# EAGLE library part H9HP52ACPMADAR-KMM (library H9HP52ACPMADAR)
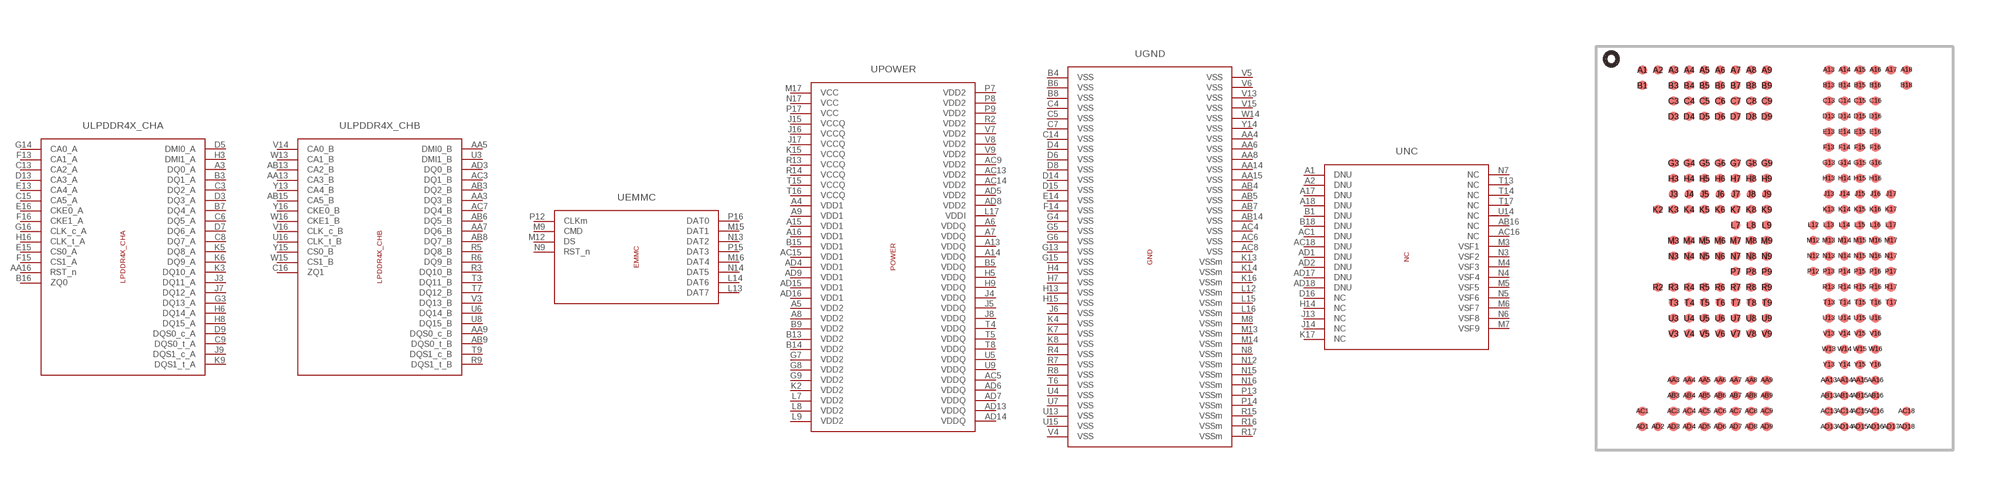
[diagram p0: symbol with the pads of FBGA254_11.5X13.0_P0.50; footprint FBGA254_11.5X13.0_P0.50]

Designator prefix U; gates LPDDR4X_CHA=LPDDR4X_CHA LPDDR4X_CHB=LPDDR4X_CHB EMMC=EMMC POWER=POWER GND=GND NC=NC

## H9HP52ACPMADAR-KMM  [FBGA254_11.5X13.0_P0.50]
A1  NC:DNU  nc
A2  NC:DNU  nc
A3  LPDDR4X_CHA:DQ0_A
A4  POWER:VDD1  pwr
A5  POWER:VDD2  pwr
A6  POWER:VDDQ  pwr
A7  POWER:VDDQ  pwr
A8  POWER:VDD2  pwr
A9  POWER:VDD1  pwr
A13  POWER:VDDQ  pwr
A14  POWER:VDDQ  pwr
A15  POWER:VDD1  pwr
A16  POWER:VDD1  pwr
A17  NC:DNU  nc
A18  NC:DNU  nc
AA3  LPDDR4X_CHB:DQ3_B
AA4  GND:VSS  pas
AA5  LPDDR4X_CHB:DMI0_B
AA6  GND:VSS  pas
AA7  LPDDR4X_CHB:DQ6_B
AA8  GND:VSS  pas
AA9  LPDDR4X_CHB:DQS0_c_B
AA13  LPDDR4X_CHB:CA3_B  in
AA14  GND:VSS  pas
AA15  GND:VSS  pas
AA16  LPDDR4X_CHA:RST_n  in
AB3  LPDDR4X_CHB:DQ2_B
AB4  GND:VSS  pas
AB5  GND:VSS  pas
AB6  LPDDR4X_CHB:DQ5_B
AB7  GND:VSS  pas
AB8  LPDDR4X_CHB:DQ7_B
AB9  LPDDR4X_CHB:DQS0_t_B
AB13  LPDDR4X_CHB:CA2_B  in
AB14  GND:VSS  pas
AB15  LPDDR4X_CHB:CA5_B  in
AB16  NC:NC  nc
AC1  NC:DNU  nc
AC3  LPDDR4X_CHB:DQ1_B
AC4  GND:VSS  pas
AC5  POWER:VDDQ  pwr
AC6  GND:VSS  pas
AC7  LPDDR4X_CHB:DQ4_B
AC8  GND:VSS  pas
AC9  POWER:VDD2  pwr
AC13  POWER:VDD2  pwr
AC14  POWER:VDD2  pwr
AC15  POWER:VDD1  pwr
AC16  NC:NC  nc
AC18  NC:DNU  nc
AD1  NC:DNU  nc
AD2  NC:DNU  nc
AD3  LPDDR4X_CHB:DQ0_B
AD4  POWER:VDD1  pwr
AD5  POWER:VDD2  pwr
AD6  POWER:VDDQ  pwr
AD7  POWER:VDDQ  pwr
AD8  POWER:VDD2  pwr
AD9  POWER:VDD1  pwr
AD13  POWER:VDDQ  pwr
AD14  POWER:VDDQ  pwr
AD15  POWER:VDD1  pwr
AD16  POWER:VDD1  pwr
AD17  NC:DNU  nc
AD18  NC:DNU  nc
B1  NC:DNU  nc
B3  LPDDR4X_CHA:DQ1_A
B4  GND:VSS  pas
B5  POWER:VDDQ  pwr
B6  GND:VSS  pas
B7  LPDDR4X_CHA:DQ4_A
B8  GND:VSS  pas
B9  POWER:VDD2  pwr
B13  POWER:VDD2  pwr
B14  POWER:VDD2  pwr
B15  POWER:VDD1  pwr
B16  LPDDR4X_CHA:ZQ0  pas
B18  NC:DNU  nc
C3  LPDDR4X_CHA:DQ2_A
C4  GND:VSS  pas
C5  GND:VSS  pas
C6  LPDDR4X_CHA:DQ5_A
C7  GND:VSS  pas
C8  LPDDR4X_CHA:DQ7_A
C9  LPDDR4X_CHA:DQS0_t_A
C13  LPDDR4X_CHA:CA2_A  in
C14  GND:VSS  pas
C15  LPDDR4X_CHA:CA5_A  in
C16  LPDDR4X_CHB:ZQ1  pas
D3  LPDDR4X_CHA:DQ3_A
D4  GND:VSS  pas
D5  LPDDR4X_CHA:DMI0_A
D6  GND:VSS  pas
D7  LPDDR4X_CHA:DQ6_A
D8  GND:VSS  pas
D9  LPDDR4X_CHA:DQS0_c_A
D13  LPDDR4X_CHA:CA3_A  in
D14  GND:VSS  pas
D15  GND:VSS  pas
D16  NC:NC  nc
E13  LPDDR4X_CHA:CA4_A  in
E14  GND:VSS  pas
E15  LPDDR4X_CHA:CS0_A  in
E16  LPDDR4X_CHA:CKE0_A  in
F13  LPDDR4X_CHA:CA1_A  in
F14  GND:VSS  pas
F15  LPDDR4X_CHA:CS1_A  in
F16  LPDDR4X_CHA:CKE1_A  in
G3  LPDDR4X_CHA:DQ13_A
G4  GND:VSS  pas
G5  GND:VSS  pas
G6  GND:VSS  pas
G7  POWER:VDD2  pwr
G8  POWER:VDD2  pwr
G9  POWER:VDD2  pwr
G13  GND:VSS  pas
G14  LPDDR4X_CHA:CA0_A  in
G15  GND:VSS  pas
G16  LPDDR4X_CHA:CLK_c_A  in
H3  LPDDR4X_CHA:DMI1_A
H4  GND:VSS  pas
H5  POWER:VDDQ  pwr
H6  LPDDR4X_CHA:DQ14_A
H7  GND:VSS  pas
H8  LPDDR4X_CHA:DQ15_A
H9  POWER:VDDQ  pwr
H13  GND:VSS  pas
H14  NC:NC  nc
H15  GND:VSS  pas
H16  LPDDR4X_CHA:CLK_t_A  in
J3  LPDDR4X_CHA:DQ11_A
J4  POWER:VDDQ  pwr
J5  POWER:VDDQ  pwr
J6  GND:VSS  pas
J7  LPDDR4X_CHA:DQ12_A
J8  POWER:VDDQ  pwr
J9  LPDDR4X_CHA:DQS1_c_A
J13  NC:NC  nc
J14  NC:NC  nc
J15  POWER:VCCQ  pwr
J16  POWER:VCCQ  pwr
J17  POWER:VCCQ  pwr
K2  POWER:VDD2  pwr
K3  LPDDR4X_CHA:DQ10_A
K4  GND:VSS  pas
K5  LPDDR4X_CHA:DQ8_A
K6  LPDDR4X_CHA:DQ9_A
K7  GND:VSS  pas
K8  GND:VSS  pas
K9  LPDDR4X_CHA:DQS1_t_A
K13  GND:VSSm  pas
K14  GND:VSSm  pas
K15  POWER:VCCQ  pwr
K16  GND:VSSm  pas
K17  NC:NC  nc
L7  POWER:VDD2  pwr
L8  POWER:VDD2  pwr
L9  POWER:VDD2  pwr
L12  GND:VSSm  pas
L13  EMMC:DAT7
L14  EMMC:DAT6
L15  GND:VSSm  pas
L16  GND:VSSm  pas
L17  POWER:VDDI  pas
M3  NC:VSF1  nc
M4  NC:VSF3  nc
M5  NC:VSF5  nc
M6  NC:VSF7  nc
M7  NC:VSF9  nc
M8  GND:VSSm  pas
M9  EMMC:CMD
M12  EMMC:DS  out
M13  GND:VSSm  pas
M14  GND:VSSm  pas
M15  EMMC:DAT1
M16  EMMC:DAT4
M17  POWER:VCC  pwr
N3  NC:VSF2  nc
N4  NC:VSF4  nc
N5  NC:VSF6  nc
N6  NC:VSF8  nc
N7  NC:NC  nc
N8  GND:VSSm  pas
N9  EMMC:RST_n  in
N12  GND:VSSm  pas
N13  EMMC:DAT2
N14  EMMC:DAT5
N15  GND:VSSm  pas
N16  GND:VSSm  pas
N17  POWER:VCC  pwr
P7  POWER:VDD2  pwr
P8  POWER:VDD2  pwr
P9  POWER:VDD2  pwr
P12  EMMC:CLKm  in
P13  GND:VSSm  pas
P14  GND:VSSm  pas
P15  EMMC:DAT3
P16  EMMC:DAT0
P17  POWER:VCC  pwr
R2  POWER:VDD2  pwr
R3  LPDDR4X_CHB:DQ10_B
R4  GND:VSS  pas
R5  LPDDR4X_CHB:DQ8_B
R6  LPDDR4X_CHB:DQ9_B
R7  GND:VSS  pas
R8  GND:VSS  pas
R9  LPDDR4X_CHB:DQS1_t_B
R13  POWER:VCCQ  pwr
R14  POWER:VCCQ  pwr
R15  GND:VSSm  pas
R16  GND:VSSm  pas
R17  GND:VSSm  pas
T3  LPDDR4X_CHB:DQ11_B
T4  POWER:VDDQ  pwr
T5  POWER:VDDQ  pwr
T6  GND:VSS  pas
T7  LPDDR4X_CHB:DQ12_B
T8  POWER:VDDQ  pwr
T9  LPDDR4X_CHB:DQS1_c_B
T13  NC:NC  nc
T14  NC:NC  nc
T15  POWER:VCCQ  pwr
T16  POWER:VCCQ  pwr
T17  NC:NC  nc
U3  LPDDR4X_CHB:DMI1_B
U4  GND:VSS  pas
U5  POWER:VDDQ  pwr
U6  LPDDR4X_CHB:DQ14_B
U7  GND:VSS  pas
U8  LPDDR4X_CHB:DQ15_B
U9  POWER:VDDQ  pwr
U13  GND:VSS  pas
U14  NC:NC  nc
U15  GND:VSS  pas
U16  LPDDR4X_CHB:CLK_t_B  in
V3  LPDDR4X_CHB:DQ13_B
V4  GND:VSS  pas
V5  GND:VSS  pas
V6  GND:VSS  pas
V7  POWER:VDD2  pwr
V8  POWER:VDD2  pwr
V9  POWER:VDD2  pwr
V13  GND:VSS  pas
V14  LPDDR4X_CHB:CA0_B  in
V15  GND:VSS  pas
V16  LPDDR4X_CHB:CLK_c_B  in
W13  LPDDR4X_CHB:CA1_B  in
W14  GND:VSS  pas
W15  LPDDR4X_CHB:CS1_B  in
W16  LPDDR4X_CHB:CKE1_B  in
Y13  LPDDR4X_CHB:CA4_B  in
Y14  GND:VSS  pas
Y15  LPDDR4X_CHB:CS0_B  in
Y16  LPDDR4X_CHB:CKE0_B  in

## Footprint FBGA254_11.5X13.0_P0.50 (pad centres in mm)
SK hynix H9HP52ACPMADAR Rev 1.0 p. 9: 254-ball FBGA, 11.5 x 13.0 mm body, 0.50 mm pitch, ball diameter 0.300 +/- 0.050 mm before reflow. The round SMD copper pads use the 0.300 mm nominal ball diameter from that drawing. Page 9 specifies package dimensions rather than a separate PCB land pattern. The top-view A1 orientation follows the ball map on p. 6. The layer 39 courtyard extends 0.25 mm beyond the nominal body.
smd 0.3 x 0.3: A1 -4.25,5.75; A2 -3.75,5.75; A3 -3.25,5.75; A4 -2.75,5.75; A5 -2.25,5.75; A6 -1.75,5.75; A7 -1.25,5.75; A8 -0.75,5.75; A9 -0.25,5.75; A13 1.75,5.75; A14 2.25,5.75; A15 2.75,5.75; A16 3.25,5.75; A17 3.75,5.75; A18 4.25,5.75; AA3 -3.25,-4.25; AA4 -2.75,-4.25; AA5 -2.25,-4.25; AA6 -1.75,-4.25; AA7 -1.25,-4.25; AA8 -0.75,-4.25; AA9 -0.25,-4.25; AA13 1.75,-4.25; AA14 2.25,-4.25; AA15 2.75,-4.25; AA16 3.25,-4.25; AB3 -3.25,-4.75; AB4 -2.75,-4.75; AB5 -2.25,-4.75; AB6 -1.75,-4.75; AB7 -1.25,-4.75; AB8 -0.75,-4.75; AB9 -0.25,-4.75; AB13 1.75,-4.75; AB14 2.25,-4.75; AB15 2.75,-4.75; AB16 3.25,-4.75; AC1 -4.25,-5.25; AC3 -3.25,-5.25; AC4 -2.75,-5.25; AC5 -2.25,-5.25; AC6 -1.75,-5.25; AC7 -1.25,-5.25; AC8 -0.75,-5.25; AC9 -0.25,-5.25; AC13 1.75,-5.25; AC14 2.25,-5.25; AC15 2.75,-5.25; AC16 3.25,-5.25; AC18 4.25,-5.25; AD1 -4.25,-5.75; AD2 -3.75,-5.75; AD3 -3.25,-5.75; AD4 -2.75,-5.75; AD5 -2.25,-5.75; AD6 -1.75,-5.75; AD7 -1.25,-5.75; AD8 -0.75,-5.75; AD9 -0.25,-5.75; AD13 1.75,-5.75; AD14 2.25,-5.75; AD15 2.75,-5.75; AD16 3.25,-5.75; AD17 3.75,-5.75; AD18 4.25,-5.75; B1 -4.25,5.25; B3 -3.25,5.25; B4 -2.75,5.25; B5 -2.25,5.25; B6 -1.75,5.25; B7 -1.25,5.25; B8 -0.75,5.25; B9 -0.25,5.25; B13 1.75,5.25; B14 2.25,5.25; B15 2.75,5.25; B16 3.25,5.25; B18 4.25,5.25; C3 -3.25,4.75; C4 -2.75,4.75; C5 -2.25,4.75; C6 -1.75,4.75; C7 -1.25,4.75; C8 -0.75,4.75; C9 -0.25,4.75; C13 1.75,4.75; C14 2.25,4.75; C15 2.75,4.75; C16 3.25,4.75; D3 -3.25,4.25; D4 -2.75,4.25; D5 -2.25,4.25; D6 -1.75,4.25; D7 -1.25,4.25; D8 -0.75,4.25; D9 -0.25,4.25; D13 1.75,4.25; D14 2.25,4.25; D15 2.75,4.25; D16 3.25,4.25; E13 1.75,3.75; E14 2.25,3.75; E15 2.75,3.75; E16 3.25,3.75; F13 1.75,3.25; F14 2.25,3.25; F15 2.75,3.25; F16 3.25,3.25; G3 -3.25,2.75; G4 -2.75,2.75; G5 -2.25,2.75; G6 -1.75,2.75; G7 -1.25,2.75; G8 -0.75,2.75; G9 -0.25,2.75; G13 1.75,2.75; G14 2.25,2.75; G15 2.75,2.75; G16 3.25,2.75; H3 -3.25,2.25; H4 -2.75,2.25; H5 -2.25,2.25; H6 -1.75,2.25; H7 -1.25,2.25; H8 -0.75,2.25; H9 -0.25,2.25; H13 1.75,2.25; H14 2.25,2.25; H15 2.75,2.25; H16 3.25,2.25; J3 -3.25,1.75; J4 -2.75,1.75; J5 -2.25,1.75; J6 -1.75,1.75; J7 -1.25,1.75; J8 -0.75,1.75; J9 -0.25,1.75; J13 1.75,1.75; J14 2.25,1.75; J15 2.75,1.75; J16 3.25,1.75; J17 3.75,1.75; K2 -3.75,1.25; K3 -3.25,1.25; K4 -2.75,1.25; K5 -2.25,1.25; K6 -1.75,1.25; K7 -1.25,1.25; K8 -0.75,1.25; K9 -0.25,1.25; K13 1.75,1.25; K14 2.25,1.25; K15 2.75,1.25; K16 3.25,1.25; K17 3.75,1.25; L7 -1.25,0.75; L8 -0.75,0.75; L9 -0.25,0.75; L12 1.25,0.75; L13 1.75,0.75; L14 2.25,0.75; L15 2.75,0.75; L16 3.25,0.75; L17 3.75,0.75; M3 -3.25,0.25; M4 -2.75,0.25; M5 -2.25,0.25; M6 -1.75,0.25; M7 -1.25,0.25; M8 -0.75,0.25; M9 -0.25,0.25; M12 1.25,0.25; M13 1.75,0.25; M14 2.25,0.25; M15 2.75,0.25; M16 3.25,0.25; M17 3.75,0.25; N3 -3.25,-0.25; N4 -2.75,-0.25; N5 -2.25,-0.25; N6 -1.75,-0.25; N7 -1.25,-0.25; N8 -0.75,-0.25; N9 -0.25,-0.25; N12 1.25,-0.25; N13 1.75,-0.25; N14 2.25,-0.25; N15 2.75,-0.25; N16 3.25,-0.25; N17 3.75,-0.25; P7 -1.25,-0.75; P8 -0.75,-0.75; P9 -0.25,-0.75; P12 1.25,-0.75; P13 1.75,-0.75; P14 2.25,-0.75; P15 2.75,-0.75; P16 3.25,-0.75; P17 3.75,-0.75; R2 -3.75,-1.25; R3 -3.25,-1.25; R4 -2.75,-1.25; R5 -2.25,-1.25; R6 -1.75,-1.25; R7 -1.25,-1.25; R8 -0.75,-1.25; R9 -0.25,-1.25; R13 1.75,-1.25; R14 2.25,-1.25; R15 2.75,-1.25; R16 3.25,-1.25; R17 3.75,-1.25; T3 -3.25,-1.75; T4 -2.75,-1.75; T5 -2.25,-1.75; T6 -1.75,-1.75; T7 -1.25,-1.75; T8 -0.75,-1.75; T9 -0.25,-1.75; T13 1.75,-1.75; T14 2.25,-1.75; T15 2.75,-1.75; T16 3.25,-1.75; T17 3.75,-1.75; U3 -3.25,-2.25; U4 -2.75,-2.25; U5 -2.25,-2.25; U6 -1.75,-2.25; U7 -1.25,-2.25; U8 -0.75,-2.25; U9 -0.25,-2.25; U13 1.75,-2.25; U14 2.25,-2.25; U15 2.75,-2.25; U16 3.25,-2.25; V3 -3.25,-2.75; V4 -2.75,-2.75; V5 -2.25,-2.75; V6 -1.75,-2.75; V7 -1.25,-2.75; V8 -0.75,-2.75; V9 -0.25,-2.75; V13 1.75,-2.75; V14 2.25,-2.75; V15 2.75,-2.75; V16 3.25,-2.75; W13 1.75,-3.25; W14 2.25,-3.25; W15 2.75,-3.25; W16 3.25,-3.25; Y13 1.75,-3.75; Y14 2.25,-3.75; Y15 2.75,-3.75; Y16 3.25,-3.75